# Altium integrated library FuncGen.IntLib: 8 symbols
Pins are listed as number, name and electrical type; pins without a type are passive.

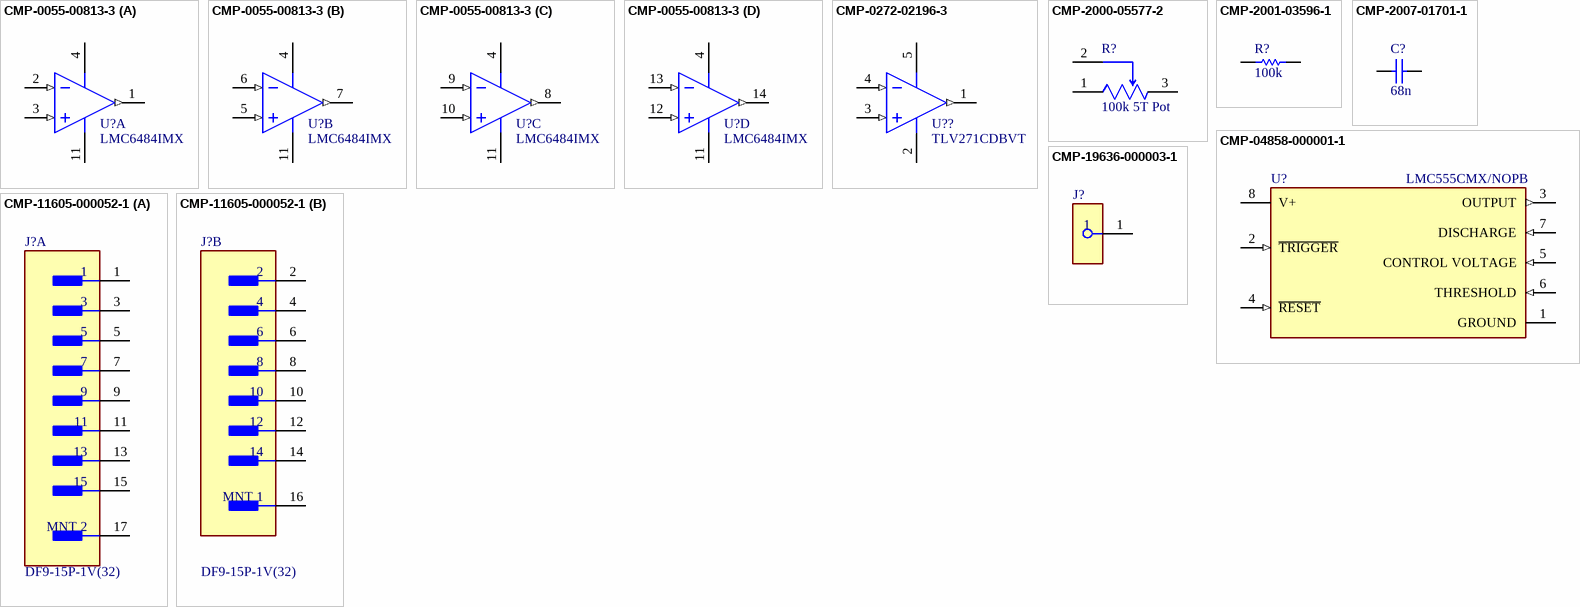
[diagram p0: symbols CMP-0055-00813-3 to CMP-19636-000003-1]

## CMP-0055-00813-3
designator U?, comment LMC6484IMX
CMOS Quad Rail to Rail Input and Output Operational Amplifier, 14-pin Narrow SOIC; Manufacturer: Texas Instruments; PackageTopMarking: NSUZXYTTE#*LMC6484IM; PowerWise: N; CompType: Amplifiers; PackageDescription: Molded Package S.O., .150in Wide, 14 Lead; Package Reference: D0014A; RoHS: N; PinCount: 14; ComponentLink1URL: http://www.ti.com/general/docs/lit/getliterature.tsp?genericPartNumber=LMC6484&fileType=pdf; ComponentLink1Description: Datasheet URL; Code_JEDEC: MS-012AB; Code_IPC: SOIC127P600-14
footprint D0014A_N (SOIC, 14-Leads, Body 8.75x4mm, Pitch 1.27mm, IPC Medium Density)
footprint D0014A_L (SOIC, 14-Leads, Body 8.75x4mm, Pitch 1.27mm, IPC High Density)
footprint D0014A_M (SOIC, 14-Leads, Body 8.75x4mm, Pitch 1.27mm, IPC Low Density)
pins on every part: 4 V+ (power), 11 V- (power)
part A pins: 1 OUT1 (out), 2 IN1- (in), 3 IN1+ (in)
part B pins: 5 IN2+ (in), 6 IN2- (in), 7 OUT2 (out)
part C pins: 8 OUT3 (out), 9 IN3- (in), 10 IN3+ (in)
part D pins: 12 IN4+ (in), 13 IN4- (in), 14 OUT4 (out)

## CMP-0272-02196-3
designator U??, comment TLV271CDBVT
550 uA/Ch, 3 MHz, Rail-to-Rail Output Operational Amplifier, 2.7 to 16 V, 0 to 70 degC, 5-pin SOT23 (DBV5), Green (RoHS & no Sb/Br); Manufacturer: Texas Instruments; Total Supply Voltage(Max)(+5V is 5, +/-5V is 10): 16; GBW(Typ)(MHz): 3; Offset Drift(Typ)(uV/C): 2; Rating: Catalog; Vio (25C)(Max)(mV): 5; Slew Rate(Typ)(V/us): 2.4; IIB(Max)(pA): 60; Packing: SMALL T&R; Total Supply Voltage(Min)(+5V is 5, +/-5V is 10): 2.7; Sub Family: Low Supply Voltage Amplifier (<=2.7V), Precision Amplifier; Iq per channel(Max)(mA): 0.66; Number of Channels: 1; CMRR(Min)(dB): 69; ComponentLink3Description: Package Specification; Code_JEDEC: MO-178; ComponentLink1Description: Manufacturer URL; Eco-Plan: Green (RoHS & no Sb/Br); PackageReference: DBV0005A; Mounting Technology: Surface Mount; ComponentLink1URL: http://www.ti.com/; ComponentLink2URL: http://www.ti.com/lit/ds/symlink/tlv271.pdf; PackageDescription: 5-Pin Plastic Small Outline, Body 1.6 x 2.9 mm, Pitch 0.95 mm; DatasheetVersion: SLOS351D; ComponentLink2Description: Datasheet; PartNumber: TLV271CDBVT; ComponentLink3URL: http://www.ti.com/litv/pdf/mpds018i; PackageVersion: 4073253-4/K, 03/2006
footprint DBV0005A_L (SOT23, 5-Leads, Body 3.05x1.75mm, Pitch 0.95mm, IPC High Density)
footprint DBV0005A_M (SOT23, 5-Leads, Body 3.05x1.75mm, Pitch 0.95mm, IPC Low Density)
footprint DBV0005A_N (SOT23, 5-Leads, Body 3.05x1.75mm, Pitch 0.95mm, IPC Medium Density)
pins: 1 OUT (out), 2 GND (power), 3 IN+ (in), 4 IN- (in), 5 VDD (power)

## CMP-2000-05577-2
designator R?, comment 100k 5T Pot
TRIMMER 10K OHM 0.25W J LEAD TOP; Manufacturer: Bourns; Manufacturer Part Number: 3214W-1-103E; Value: 10kΩ; Tolerance: 10%; Voltage Rating: 300V; Standoff Height: 0.2mm; Temperature Coefficient: 100ppm/°C; Temperature: -65°C to +150°C; Digikey Description: TRIMMER 10K OHM 0.25W J LEAD TOP; RoHS: TRUE; Mouser Description: Trimmer Resistors - SMD 4mm SQ 10K OHM; ComponentLink2URL: https://www.bourns.com/docs/product-datasheets/3214.pdf?sfvrsn=62585356_13; Automotive: No; Temperature Range High: +150°C; Device Class L2: Resistors; Device Class L3: Variable Resistors and Potentiometers; Octopart: https://octopart.com/3214w-1-103e-bourns-23348; Power Rating: 0.25W; Composition: Multiturn Cermet; Package: 3214W; Height: 5.55mm; Series: 3214; Device Class L1: Passive Components; Temperature Range Low: -65°C; Lead Free: Yes; ComponentLink2Description: Datasheet; Category: Res; Resistance: 10kΩ
footprint FP-3214W-MFG
pins: 1 CCW, 2 WIPER, 3 CW

## CMP-2001-03596-1
designator R?, comment 100k
Part Number: CRCW08051K00FKEB; Manufacturer: Vishay Dale
footprint RESC2013X50X30ML20T20 (Chip Resistor, 2-Leads, Body 2.00x1.25mm, IPC Low Density)
footprint RESC2013X50X30NL20T20 (Chip Resistor, 2-Leads, Body 2.00x1.25mm, IPC Medium Density)
footprint RESC2013X50X30LL20T20 (Chip Resistor, 2-Leads, Body 2.00x1.25mm, IPC High Density)
pins: 1, 2
1 alternate drawing of the same symbol

## CMP-2007-01701-1
designator C?, comment 68n
Manufacturer: Vitramon; Part Number: VJ0805A101KXAAC
footprint CAPC2013X145X48ML20T23 (Chip Capacitor, 2-Leads, Body 2.00x1.25mm, IPC Low Density)
footprint CAPC2013X145X48LL20T23 (Chip Capacitor, 2-Leads, Body 2.00x1.25mm, IPC High Density)
footprint CAPC2013X145X48NL20T23 (Chip Capacitor, 2-Leads, Body 2.00x1.25mm, IPC Medium Density)
pins: 1, 2
1 alternate drawing of the same symbol

## CMP-04858-000001-1
designator U?, comment LMC555CMX/NOPB
IC OSC SINGLE TIMER 3MHZ 8-SOIC; Manufacturer: Texas Instruments; Number Of Timers/Counters: 1; Max Supply Voltage: 15V; Standoff Height: 0.11mm; Propagation Delay: 100ns; Nominal Supply Current: 50-150uA; Min Supply Voltage: 1.5V; Octopart: https://octopart.com/lmc555cmx%2Fnopb-texas+instruments-24815227; Frequency: 3MHz; Device Class L2: Clock and Timing; Temperature: -40°C to +85°C; Temperature Range Low: -40°C; Height: 1.75mm; ComponentLink2URL: http://www.ti.com/general/docs/suppproductinfo.tsp?distId=10&gotoUrl=http%3A%2F%2Fwww.ti.com%2Flit%2Fgpn%2Flmc555; Package: D0008A; Device Class L1: Integrated Circuits (ICs); Manufacturer Part Number: LMC555CMX/NOPB; RoHS: TRUE; Lead Free: Yes; Temperature Range High: +85°C; Digikey Description: IC OSC SINGLE TIMER 3MHZ 8-SOIC; Device Class L3: Timers and Oscillators; ComponentLink2Description: Datasheet; Mouser Description: Timers & Support Products CMOS TIMER; Category: IC; Ipc Land Pattern Name: SOIC127P600X175-8; Automotive: No
footprint FP-D0008A-MFG
footprint FP-D0008A-IPC_C
footprint FP-D0008A-IPC_B
footprint FP-D0008A-IPC_A
pins: 1 GROUND (power), 2 ~{TRIGGER} (in), 3 OUTPUT (out), 4 ~{RESET} (in), 5 CONTROL VOLTAGE (in), 6 THRESHOLD (in), 7 DISCHARGE (in), 8 V+ (power)

## CMP-11605-000052-1
designator J?, comment DF9-15P-1V(32)
CONN HDR 15POS SMD TIN; Number of Positions: 15; Pitch: 1mm; Voltage Rating: 150V; Gender: Male; Current Rating: 500mA; Mated Stacking Heights: 4.3mm; Orientation: Straight; Lead Free: Lead Free; Housing Color: Beige; Contact Plating: Tin; Number of Rows: 2; Package Quantity: 1; Housing Material: Polyamide; Number of Contacts: 15; Termination: SMD/SMT; Mount: Surface Mount; Contact Material: Copper; Flammability Rating: UL94 V-0; Packaging: Tape and Reel; Radiation Hardening: No
footprint FP-DF9-15P-1V_32-MFG
part A pins: 1, 3, 5, 7, 9, 11, 13, 15, 17 MNT 2
part B pins: 2, 4, 6, 8, 10, 12, 14, 16 MNT 1

## CMP-19636-000003-1
designator J?
PLUG JACK MINI NON-INSULATED; Manufacturer: Keystone Electronics; Manufacturer Part Number: 476-4; Is Female: yes; Number Of Contacts: 1; Current Rating: 10A; Conn Orientation: Straight; Device Class L1: Connectors; Category: Conn; ComponentLink2Description: Datasheet; Lead Free: Yes; Device Class L3: unset; Package: 476-4; RoHS: TRUE; Contact Material: Tin; Footprint Url: https://www.keyelco.com/product-pdf.cfm?p=2378; Mouser Description: Test Plugs & Test Jacks BANANA JACK NON-INSUL; Octopart: https://octopart.com/476-4-keystone-225161; Device Class L2: unset; ComponentLink2URL: https://www.keyelco.com/userAssets/file/M65p111.pdf; Digikey Description: PLUG JACK MINI NON-INSULATED; Automotive: No
footprint FP-476-4-MFG
pins: 1